# Altium schematic symbol library R40N3011851012.SchLib: 1 symbol
Pins are listed as number, name and electrical type; pins without a type are passive.

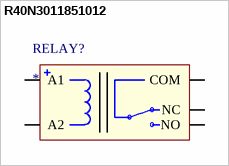
[diagram p0: symbol R40N3011851012]

## R40N3011851012
designator RELAY?
Relay: electromagnetic; Ucoil: 12VDC; SPDT; 40A; max.300VAC; R40N; Manufacturer: RELPOL
footprint R40N3011851012 (Relay: electromagnetic; Ucoil: 12VDC; SPDT; 40A; max.300VAC; R40N)
pins: A1 (power), A2 (power), COM, NC, NO